# Altium schematic symbol library resistive.SchLib: 19 symbols
Pins are listed as number, name and electrical type; pins without a type are passive.

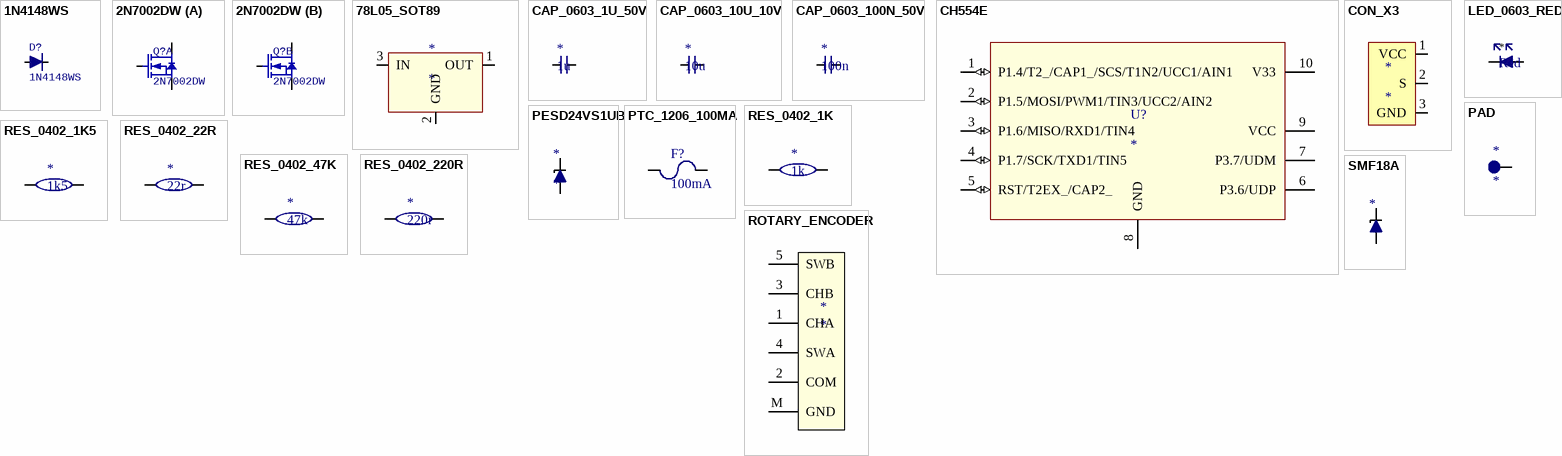
[diagram p0: symbols 1N4148WS to SMF18A]

## 1N4148WS
designator D?
Silicon Diode; Value: 1N4148WS; JLCPCB: C2128
footprint SOD-323 (SOD-323 diode, pads K (cathode, left) / A)
pins: A, K

## 2N7002DW
designator Q?
Dual N-Channel MOSFET; Value: 2N7002DW; Part: 2N7002DW; JLCPCB: C5190214
footprint SOT-363 (SOT-363 (SC-70-6), pin 1 bottom-left, 0.65mm pitch)
part A pins: 1 S, 2 G, 6 D
part B pins: 3 D, 4 S, 5 G

## 78L05_SOT89
designator *
5V LDO; Part: AS78L05RTR-E1; JLCPCB: C20628877
footprint SOT-89-3 (SOT-89-3, 1=OUT 2=GND(tab) 3=IN for 78L05 C20628877)
pins: 1 OUT (power), 2 GND (power), 3 IN (power)

## CAP_0603_1U_50V
designator *, comment 1u
MLCC; Value: 1u; JLCPCB: C15849
footprint MLCC_0603 (MLCC 0603)
pins: 1 A, 2 B

## CAP_0603_10U_10V
designator *, comment 10u
MLCC; Value: 10u; JLCPCB: C19702
footprint MLCC_0603 (MLCC 0603)
pins: 1 A, 2 B

## CAP_0603_100N_50V
designator *, comment 100n
MLCC; Value: 100n; JLCPCB: C14663
footprint MLCC_0603 (MLCC 0603)
pins: 1 A, 2 B

## CH554E
designator U?
CH554E; JLCPCB: C111293
footprint MSOP10 (MSOP10 3x3 x 0.5)
pins: 1 P1.4/T2_/CAP1_/SCS/T1N2/UCC1/AIN1 (io), 2 P1.5/MOSI/PWM1/TIN3/UCC2/AIN2 (io), 3 P1.6/MISO/RXD1/TIN4 (io), 4 P1.7/SCK/TXD1/TIN5 (io), 5 RST/T2EX_/CAP2_ (io), 6 P3.6/UDP, 7 P3.7/UDM, 8 GND (power), 9 VCC (power), 10 V33 (power)

## CON_X3
designator *  (no BOM)
footprint CON_X4
pins: 1 VCC (power), 2 S (power), 3 GND (power)

## LED_0603_RED
designator *, comment Red
LED; Value: Red; JLCPCB: C2286
footprint LED0603 (Chip LED 0603 (1608 metric), pad 1 cathode (left))
pins: A ANODE "TP", K CATHODE "TP"

## PAD
designator *
footprint PAD
pins: 1 PAD (power)

## PESD24VS1UB
designator *
TVS Diode; Value: PESD24VS1UB; JLCPCB: C85382
footprint SOD-523 (SOD-523 (SC-79) diode, pads K (cathode, left) / A)
pins: A, K

## PTC_1206_100MA
designator F?, comment 100mA
FUSE; Part: nSMD010; Value: 100mA; JLCPCB: C70065
footprint F1206 (Littelfuse 468 series 1206 fuse)
pins: 1 (power), 2 (power)

## RES_0402_1K
designator *, comment 1k
Resistor; Value: 1k; JLCPCB: C11702
footprint R0402 (Chip resistor 0402 (1005 metric))
pins: 1 A, 2 B

## RES_0402_1K5
designator *, comment 1k5
Resistor; Value: 1k5; JLCPCB: C25867
footprint R0402 (Chip resistor 0402 (1005 metric))
pins: 1 A, 2 B

## RES_0402_22R
designator *, comment 22r
Resistor; Value: 22r; JLCPCB: C25092
footprint R0402 (Chip resistor 0402 (1005 metric))
pins: 1 A, 2 B

## RES_0402_47K
designator *, comment 47k
Resistor; Value: 47k; JLCPCB: C25792
footprint R0402 (Chip resistor 0402 (1005 metric))
pins: 1 A, 2 B

## RES_0402_220R
designator *, comment 220r
Resistor; Value: 220r; JLCPCB: C25091
footprint R0402 (Chip resistor 0402 (1005 metric))
pins: 1 A, 2 B

## ROTARY_ENCODER
designator *
Rotary Encoder
footprint ENCODER (Rotary encoder)
pins: 1 CHA, 2 COM, 3 CHB, 4 SWA, 5 SWB, M GND

## SMF18A
designator *  (value not drawn)
TVS Diode; Value: SMF18A; JLCPCB: C19077512
footprint SOD-123FL (SOD-123FL diode/TVS, pad 1 = cathode (left), pad 2 = anode)
pins: A, K